# Altium footprint library PcbLib1.PcbLib: 332 footprints (part 3 of 22)
Each footprint in its own frame and in the unit in brackets; x right, y up, seen from the top. Pads: shape width x height; smd on the part's side, far side on the other; paste and mask are expansions set on the pad; w line width, h text height; cw(c..) or ccw(c..) is an arc to the next point about the centre after c.
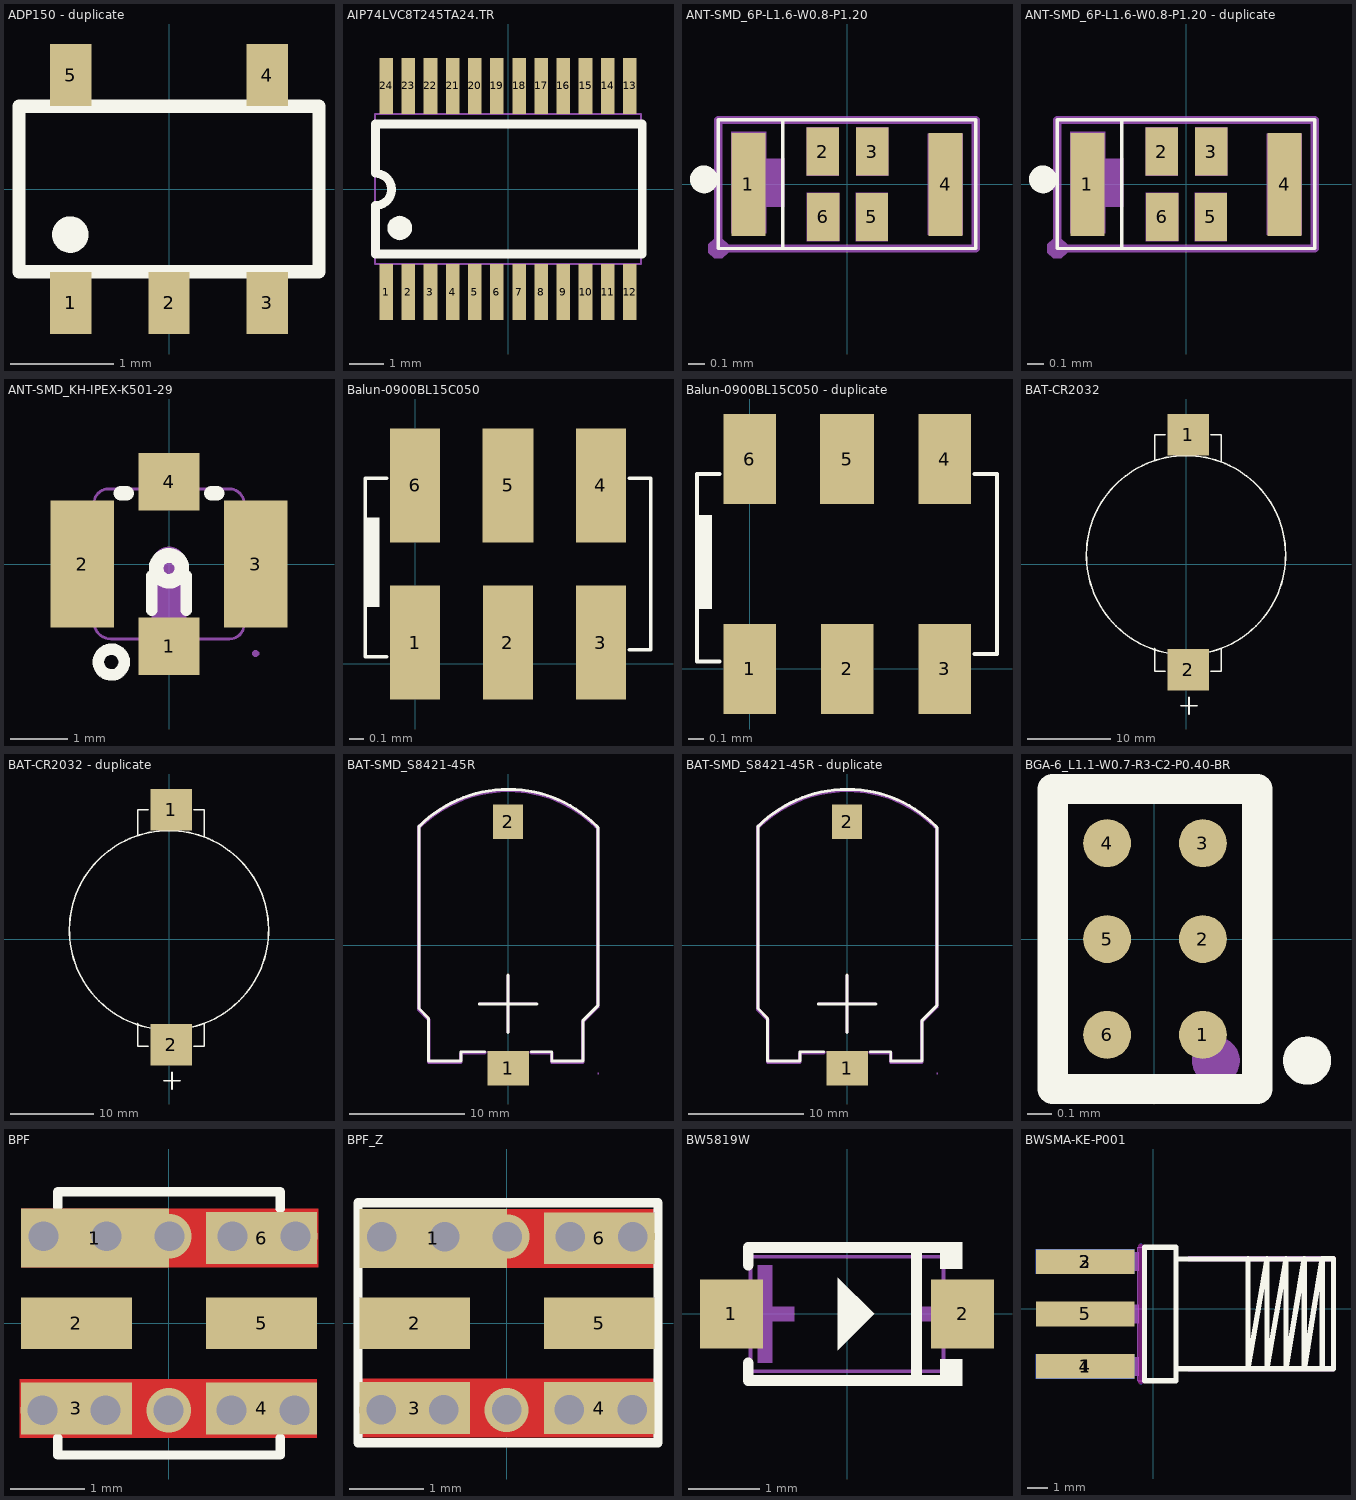
[diagram p2: the footprints below, top view; thin cyan lines are the x and y axes]

## ADP150 - duplicate [mm]
pads (5):
  rect 0.4x0.6 smd: 1(-0.95,-1.1) 2(0,-1.1) 3(0.95,-1.1) 4(0.95,1.1) 5(-0.95,1.1)
Top Overlay:
  circle w0.254: c-0.954,-0.441 r0.048
  lines w0.127: -1.45,-0.8 1.45,-0.8 1.45,0.8 -1.45,0.8 -1.45,-0.8

## AIP74LVC8T245TA24.TR [mm]
pads (24):
  rect 0.4x1.65 smd: 1(-3.575,-3.023) 2(-2.925,-3.023) 3(-2.275,-3.023) 4(-1.625,-3.023) 5(-0.975,-3.023) 6(-0.325,-3.023) 7(0.325,-3.023) 8(0.975,-3.023) 9(1.625,-3.023) 10(2.275,-3.023) 11(2.925,-3.023) 12(3.575,-3.023) 13(3.575,3.023) 14(2.925,3.023) 15(2.275,3.023) 16(1.625,3.023) 17(0.975,3.023) 18(0.325,3.023) 19(-0.325,3.023) 20(-0.975,3.023) 21(-1.625,3.023) 22(-2.275,3.023) 23(-2.925,3.023) 24(-3.575,3.023)
Top Overlay:
  region: -3.529,-1.143 -3.52,-1.064 -3.494,-0.989 -3.452,-0.922 -3.396,-0.866 -3.329,-0.824 -3.254,-0.798 -3.175,-0.789 -3.096,-0.798 -3.021,-0.824 -2.954,-0.866 -2.898,-0.922 -2.856,-0.989 -2.83,-1.064 -2.821,-1.143 -2.83,-1.222 -2.856,-1.297 -2.898,-1.364 -2.954,-1.42 -3.021,-1.462 -3.096,-1.488 -3.175,-1.497 -3.254,-1.488 -3.329,-1.462 -3.396,-1.42 -3.452,-1.364 -3.494,-1.297 -3.52,-1.222
  lines w0.254: -3.886,0.457 cw(c-3.886,-0.013) -3.886,-0.483 -3.886,-1.753 -3.886,-1.905 3.937,-1.905 3.937,1.905 -3.886,1.905 -3.886,1.753 -3.886,0.483
Mechanical 6:
  lines w0.051: -3.9,-2.2 -3.9,2.2 3.9,2.2 3.9,-2.2 -3.9,-2.2
Mechanical 7:
  region: -0.225,2.588 -0.425,2.588 -0.425,2.188 -0.225,2.188
  region: -0.875,2.588 -1.075,2.588 -1.075,2.188 -0.875,2.188
  region: -1.525,2.588 -1.725,2.588 -1.725,2.188 -1.525,2.188
  region: -2.175,2.588 -2.375,2.588 -2.375,2.188 -2.175,2.188
  region: -2.825,2.588 -3.025,2.588 -3.025,2.188 -2.825,2.188
  region: -3.475,2.588 -3.675,2.588 -3.675,2.188 -3.475,2.188
  region: 3.675,2.588 3.475,2.588 3.475,2.188 3.675,2.188
  region: 3.025,2.588 2.825,2.588 2.825,2.188 3.025,2.188
  region: 2.375,2.588 2.175,2.588 2.175,2.188 2.375,2.188
  region: 1.725,2.588 1.525,2.588 1.525,2.188 1.725,2.188
  region: 1.075,2.588 0.875,2.588 0.875,2.188 1.075,2.188
  region: 0.425,2.588 0.225,2.588 0.225,2.188 0.425,2.188
  region: 0.225,-2.588 0.425,-2.588 0.425,-2.188 0.225,-2.188
  region: 0.875,-2.588 1.075,-2.588 1.075,-2.188 0.875,-2.188
  region: 1.525,-2.588 1.725,-2.588 1.725,-2.188 1.525,-2.188
  region: 2.175,-2.588 2.375,-2.588 2.375,-2.188 2.175,-2.188
  region: 2.825,-2.588 3.025,-2.588 3.025,-2.188 2.825,-2.188
  region: 3.475,-2.588 3.675,-2.588 3.675,-2.188 3.475,-2.188
  region: -3.675,-2.588 -3.475,-2.588 -3.475,-2.188 -3.675,-2.188
  region: -3.025,-2.588 -2.825,-2.588 -2.825,-2.188 -3.025,-2.188
  region: -2.375,-2.588 -2.175,-2.588 -2.175,-2.188 -2.375,-2.188
  region: -1.725,-2.588 -1.525,-2.588 -1.525,-2.188 -1.725,-2.188
  region: -1.075,-2.588 -0.875,-2.588 -0.875,-2.188 -1.075,-2.188
  region: -0.425,-2.588 -0.225,-2.588 -0.225,-2.188 -0.425,-2.188
Mechanical 9:
  region: -0.225,2.586 -0.425,2.586 -0.425,3.186 -0.225,3.186
  region: -0.875,2.586 -1.075,2.586 -1.075,3.186 -0.875,3.186
  region: -1.525,2.586 -1.725,2.586 -1.725,3.186 -1.525,3.186
  region: -2.175,2.586 -2.375,2.586 -2.375,3.186 -2.175,3.186
  region: -2.825,2.586 -3.025,2.586 -3.025,3.186 -2.825,3.186
  region: -3.475,2.586 -3.675,2.586 -3.675,3.186 -3.475,3.186
  region: 3.675,2.586 3.475,2.586 3.475,3.186 3.675,3.186
  region: 3.025,2.586 2.825,2.586 2.825,3.186 3.025,3.186
  region: 2.375,2.586 2.175,2.586 2.175,3.186 2.375,3.186
  region: 1.725,2.586 1.525,2.586 1.525,3.186 1.725,3.186
  region: 1.075,2.586 0.875,2.586 0.875,3.186 1.075,3.186
  region: 0.425,2.586 0.225,2.586 0.225,3.186 0.425,3.186
  region: 0.225,-2.586 0.425,-2.586 0.425,-3.186 0.225,-3.186
  region: 0.875,-2.586 1.075,-2.586 1.075,-3.186 0.875,-3.186
  region: 1.525,-2.586 1.725,-2.586 1.725,-3.186 1.525,-3.186
  region: 2.175,-2.586 2.375,-2.586 2.375,-3.186 2.175,-3.186
  region: 2.825,-2.586 3.025,-2.586 3.025,-3.186 2.825,-3.186
  region: 3.475,-2.586 3.675,-2.586 3.675,-3.186 3.475,-3.186
  region: -3.675,-2.586 -3.475,-2.586 -3.475,-3.186 -3.675,-3.186
  region: -3.025,-2.586 -2.825,-2.586 -2.825,-3.186 -3.025,-3.186
  region: -2.375,-2.586 -2.175,-2.586 -2.175,-3.186 -2.375,-3.186
  region: -1.725,-2.586 -1.525,-2.586 -1.525,-3.186 -1.725,-3.186
  region: -1.075,-2.586 -0.875,-2.586 -0.875,-3.186 -1.075,-3.186
  region: -0.425,-2.586 -0.225,-2.586 -0.225,-3.186 -0.425,-3.186

## ANT-SMD_6P-L1.6-W0.8-P1.20 [mil]
pads (6):
  rect 8.3x25.2 smd mask+2: 1(-24.1,0) 4(24.1,0)
  rect 7.9x11.8 smd mask+2: 2(-5.9,8) 3(6.2,8) 5(6.1,-8) 6(-5.8,-8)
Top Overlay:
  circle w4: c-35,1.2 r1.4
  lines w0.8: -15.7,-15.7 -15.7,15.8 ; -31.5,-15.7 31.5,-15.7 31.5,15.8 -31.5,15.8 -31.5,-15.7
Top Paste:
  region: -19.9,12.6 -19.9,-12.6 -28.2,-12.6 -28.2,12.6
  region: 10.2,13.9 10.1,6.1 4.6,6.1 4.6,13.9
  region: 28.2,12.6 28.2,-12.6 19.9,-12.6 19.9,12.6
  region: 10,-6.1 10,-13.9 4.6,-13.9 4.6,-6.1
  region: -4.4,-6.1 -4.4,-13.9 -9.8,-13.9 -9.8,-6.1
  region: -9.9,6 -9.9,13.9 -4.5,13.9 -4.5,6
Mechanical 6:
  region: -26.8,6.3 -26.8,-5.5 -15.4,-5.5 -15.4,6.3
Mechanical 15:
  region: -29.1,-15.7 -29.1,-14.71 -30.51,-13.3 -32.49,-13.3 -33.9,-14.71 -33.9,-15.7 -33.9,-16.69 -32.49,-18.1 -30.51,-18.1 -29.1,-16.69 -29.1,-15.7
  region: -2,13.9 -2,2.1 -9.9,2.1 -9.9,13.9
  region: 10.1,13.9 10.1,2.1 2.3,2.1 2.3,13.9
  region: 10,-2.1 10,-13.9 2.1,-13.9 2.1,-2.1
  region: -1.9,-2.1 -1.9,-13.9 -9.8,-13.9 -9.8,-2.1
  region: 19.8,-12.4 19.8,12.4 28.3,12.4 28.3,-12.4
  region: -28.3,-12 -28.3,12.8 -19.8,12.8 -19.8,-12
  lines w2: -31.5,-15.7 31.5,-15.7 31.5,15.7 -31.5,15.7 -31.5,-15.7

## ANT-SMD_6P-L1.6-W0.8-P1.20 - duplicate [mil]
pads (6):
  rect 8.3x25.2 smd mask+2: 1(-24.1,0) 4(24.1,0)
  rect 7.9x11.8 smd mask+2: 2(-5.9,8) 3(6.2,8) 5(6.1,-8) 6(-5.8,-8)
Top Overlay:
  circle w4: c-35,1.2 r1.4
  lines w0.8: -15.7,-15.7 -15.7,15.8 ; -31.5,-15.7 31.5,-15.7 31.5,15.8 -31.5,15.8 -31.5,-15.7
Top Paste:
  region: -19.9,12.6 -19.9,-12.6 -28.2,-12.6 -28.2,12.6
  region: 10.2,13.9 10.1,6.1 4.6,6.1 4.6,13.9
  region: 28.2,12.6 28.2,-12.6 19.9,-12.6 19.9,12.6
  region: 10,-6.1 10,-13.9 4.6,-13.9 4.6,-6.1
  region: -4.4,-6.1 -4.4,-13.9 -9.8,-13.9 -9.8,-6.1
  region: -9.9,6 -9.9,13.9 -4.5,13.9 -4.5,6
Mechanical 6:
  region: -26.8,6.3 -26.8,-5.5 -15.4,-5.5 -15.4,6.3
Mechanical 15:
  region: -29.1,-15.7 -29.1,-14.71 -30.51,-13.3 -32.49,-13.3 -33.9,-14.71 -33.9,-15.7 -33.9,-16.69 -32.49,-18.1 -30.51,-18.1 -29.1,-16.69 -29.1,-15.7
  region: -2,13.9 -2,2.1 -9.9,2.1 -9.9,13.9
  region: 10.1,13.9 10.1,2.1 2.3,2.1 2.3,13.9
  region: 10,-2.1 10,-13.9 2.1,-13.9 2.1,-2.1
  region: -1.9,-2.1 -1.9,-13.9 -9.8,-13.9 -9.8,-2.1
  region: 19.8,-12.4 19.8,12.4 28.3,12.4 28.3,-12.4
  region: -28.3,-12 -28.3,12.8 -19.8,12.8 -19.8,-12
  lines w2: -31.5,-15.7 31.5,-15.7 31.5,15.7 -31.5,15.7 -31.5,-15.7

## ANT-SMD_KH-IPEX-K501-29 [mm]
pads (4):
  rect 1.05x1 smd paste+0 mask+0.051: 1(0,-1.425) 4(0,1.425)
  rect 1.1x2.2 smd paste+0 mask+0.051: 2(-1.5,0) 3(1.5,0)
Top Overlay:
  circle w0.254: c0,-0.075 r0.224
  circle w0.2: c-1,-1.7 r0.224
  lines w0.2: -0.3,-0.8 -0.3,-0.2 ; 0.3,-0.8 0.3,-0.2
  lines w0.254: -0.837,1.225 -0.731,1.225 ; 0.731,1.225 0.837,1.225
Mechanical 6:
  circle w0.2: c-0.3,-1.625 r0.1
  circle w0.3: c0,0 r0.15
  region: 0.3,-1 0.3,0 -0.3,0 -0.3,-1
Mechanical 15:
  region: 1.56,-1.551 1.56,-1.526 1.525,-1.491 1.475,-1.491 1.44,-1.526 1.44,-1.551 1.44,-1.576 1.475,-1.611 1.525,-1.611 1.56,-1.576 1.56,-1.551
  region: -1.05,0.9 -1.05,-0.9 -1.5,-0.9 -1.5,0.9
  region: 1.05,-0.9 1.05,0.9 1.5,0.9 1.5,-0.9
  region: -0.3,-1 0.3,-1 0.3,-1.551 -0.3,-1.551
  region: 0.3,1.201 -0.3,1.201 -0.3,1.651 0.3,1.651
  lines w0.051: 1.051,-1.299 ccw(c1.051,-1.05) 1.299,-1.05 1.299,-1.045 ccw(c1.299,-1.044) 1.3,-1.044 1.3,1.051 ccw(c1.05,1.051) 1.05,1.301 0.97,1.301 -1.048,1.3 -1.052,1.3 ccw(c-1.052,1.053) -1.299,1.053 -1.299,-0.924 cw(c-1.3,-0.924) -1.3,-0.925 -1.3,-1.007 ccw(c-1.008,-1.007) -1.008,-1.299 1.051,-1.299 ; 1.051,-1.299 1.051,-1.299

## Balun-0900BL15C050 [mm]
height 1.35
pads (6):
  rect 0.35x0.8 smd mask+0.051: 1(0,0.15) 2(0.65,0.15) 3(1.3,0.15) 4(1.3,1.25) 6(0,1.25)
  rect 0.36x0.8 smd mask+0.051: 5(0.65,1.25)
Top Overlay:
  region: -0.25,1.025 -0.35,1.025 -0.35,0.4 -0.25,0.4
  lines w0.025: -0.2,1.3 -0.35,1.3 -0.35,0.05 -0.325,0.05 -0.2,0.05 ; 1.5,1.3 1.65,1.3 1.65,0.1 1.5,0.1 ; 1.5,0.1 1.5,0.1
3D body "Balun0805-2450FB15L0001.STEP": height 0.8, standoff 0, extent -0.344,0.058 1.656,1.308

## Balun-0900BL15C050 - duplicate [mm]
height 1.35
pads (6):
  rect 0.35x0.6 smd mask+0.051: 1(0,0) 2(0.65,0) 3(1.3,0) 4(1.3,1.4) 6(0,1.4)
  rect 0.36x0.6 smd mask+0.051: 5(0.65,1.4)
Top Overlay:
  region: -0.25,1.025 -0.35,1.025 -0.35,0.4 -0.25,0.4
  lines w0.025: -0.2,1.3 -0.35,1.3 -0.35,0.05 -0.325,0.05 -0.2,0.05 ; 1.5,1.3 1.65,1.3 1.65,0.1 1.5,0.1 ; 1.5,0.1 1.5,0.1
3D body "Balun0805-2450FB15L0001.STEP": height 0.8, standoff 0, extent -0.344,0.058 1.656,1.308

## BAT-CR2032 [mm]
pads (2):
  rect 5x5 smd: 1(0.248,15.62) 2(0.248,-12.68)
Top Overlay:
  lines w0.2: -3.752,-10.13 -3.752,-12.88 -2.502,-12.88 ; -3.752,12.62 -3.752,15.62 -2.502,15.62 ; -0.63,-17.02 1.37,-17.02 ; -0.002,13.12 ccw(c0,1.12) 0.002,13.12 ; 0.37,-18.02 0.37,-16.02 ; 2.998,-12.88 4.248,-12.88 4.248,-10.13 ; 2.998,15.62 4.248,15.62 4.248,12.37

## BAT-CR2032 - duplicate [mm]
pads (2):
  rect 5x5 smd: 1(0.248,15.62) 2(0.248,-12.68)
Top Overlay:
  lines w0.2: -3.752,-10.13 -3.752,-12.88 -2.502,-12.88 ; -3.752,12.62 -3.752,15.62 -2.502,15.62 ; -0.63,-17.02 1.37,-17.02 ; -0.002,13.12 ccw(c0,1.12) 0.002,13.12 ; 0.37,-18.02 0.37,-16.02 ; 2.998,-12.88 4.248,-12.88 4.248,-10.13 ; 2.998,15.62 4.248,15.62 4.248,12.37

## BAT-SMD_S8421-45R [mm]
pads (2):
  rect 3.6x3 smd mask+0.05: 1(0,-10.7)
  rect 2.6x3 smd mask+0.05: 2(0,10.7)
Top Overlay:
  lines w0.254: -7.747,10.361 -7.747,-5.515 -6.9,-6.362 -6.9,-10.062 -4.1,-10.062 -4.1,-9.262 -2.031,-9.262 ; -7.7,10.338 cw(c0.025,2.613) 0.025,13.538 0.1,13.538 cw(c0.1,2.916) 7.611,10.427 7.8,10.238 7.8,-5.262 6.5,-6.562 6.5,-10.062 3.8,-10.062 3.8,-9.262 2.031,-9.262 ; -2.5,-5.1 2.5,-5.1 ; 0,-7.6 0,-2.6
Mechanical 6:
  drawing of 6 lines, arcs and shapes, not listed
Mechanical 15:
  region: 7.897,-11.15 7.897,-11.125 7.862,-11.09 7.813,-11.09 7.777,-11.125 7.777,-11.15 7.777,-11.175 7.813,-11.21 7.862,-11.21 7.897,-11.175 7.897,-11.15
  region: -1.4,-9.262 1.4,-9.262 1.4,-11.15 -1.4,-11.15
  region: 1,11.9 1,9.5 -1,9.5 -1,11.9
  lines w0.051: -7.784,-5.26 -7.784,10.361 cw(c-0.118,2.696) -0.118,13.536 -0.037,13.536 0.045,13.536 cw(c0.045,2.696) 7.71,10.361 cw(c7.404,10.055) 7.837,10.055 7.837,-5.26 6.44,-6.53 6.44,-10.086 3.773,-10.086 3.773,-9.262 -4.101,-9.262 -4.101,-10.086 -6.9,-10.086 -6.9,-6.53 -7.784,-5.26

## BAT-SMD_S8421-45R - duplicate [mm]
pads (2):
  rect 3.6x3 smd mask+0.05: 1(0,-10.7)
  rect 2.6x3 smd mask+0.05: 2(0,10.7)
Top Overlay:
  lines w0.254: -7.747,10.361 -7.747,-5.515 -6.9,-6.362 -6.9,-10.062 -4.1,-10.062 -4.1,-9.262 -2.031,-9.262 ; -7.7,10.338 cw(c0.025,2.613) 0.025,13.538 0.1,13.538 cw(c0.1,2.916) 7.611,10.427 7.8,10.238 7.8,-5.262 6.5,-6.562 6.5,-10.062 3.8,-10.062 3.8,-9.262 2.031,-9.262 ; -2.5,-5.1 2.5,-5.1 ; 0,-7.6 0,-2.6
Mechanical 6:
  drawing of 6 lines, arcs and shapes, not listed
Mechanical 15:
  region: 7.897,-11.15 7.897,-11.125 7.862,-11.09 7.813,-11.09 7.777,-11.125 7.777,-11.15 7.777,-11.175 7.813,-11.21 7.862,-11.21 7.897,-11.175 7.897,-11.15
  region: -1.4,-9.262 1.4,-9.262 1.4,-11.15 -1.4,-11.15
  region: 1,11.9 1,9.5 -1,9.5 -1,11.9
  lines w0.051: -7.784,-5.26 -7.784,10.361 cw(c-0.118,2.696) -0.118,13.536 -0.037,13.536 0.045,13.536 cw(c0.045,2.696) 7.71,10.361 cw(c7.404,10.055) 7.837,10.055 7.837,-5.26 6.44,-6.53 6.44,-10.086 3.773,-10.086 3.773,-9.262 -4.101,-9.262 -4.101,-10.086 -6.9,-10.086 -6.9,-6.53 -7.784,-5.26

## BGA-6_L1.1-W0.7-R3-C2-P0.40-BR [mm]
pads (6):
  round 0.2 smd paste-100 mask+0.05: 1(0.203,-0.4) 2(0.203,0) 3(0.203,0.4) 4(-0.197,0.4) 5(-0.197,0) 6(-0.197,-0.4)
Top Overlay:
  circle w0.1: c0.638,-0.508 r0.05
  lines w0.127: -0.423,-0.626 0.429,-0.626 0.429,0.626 -0.423,0.626 -0.423,-0.626
Top Paste:
  region: 0.271,-0.485 0.135,-0.485 0.118,-0.468 0.118,-0.332 0.135,-0.315 0.271,-0.315 0.288,-0.332 0.288,-0.468
  region: 0.271,-0.085 0.135,-0.085 0.118,-0.068 0.118,0.068 0.135,0.085 0.271,0.085 0.288,0.068 0.288,-0.068
  region: 0.271,0.315 0.135,0.315 0.118,0.332 0.118,0.468 0.135,0.485 0.271,0.485 0.288,0.468 0.288,0.332
  region: -0.129,-0.485 -0.265,-0.485 -0.282,-0.468 -0.282,-0.332 -0.265,-0.315 -0.129,-0.315 -0.112,-0.332 -0.112,-0.468
  region: -0.129,-0.085 -0.265,-0.085 -0.282,-0.068 -0.282,0.068 -0.265,0.085 -0.129,0.085 -0.112,0.068 -0.112,-0.068
  region: -0.129,0.315 -0.265,0.315 -0.282,0.332 -0.282,0.468 -0.265,0.485 -0.129,0.485 -0.112,0.468 -0.112,0.332
Mechanical 15:
  circle w0.1: c0.257,-0.508 r0.05

## BPF [mm]
pads (6):
  rect 2x0.8 smd: 1(-1,1.15)
  rect 1.5x0.7 smd: 2(-1.25,0) 3(-1.25,-1.15) 4(1.25,-1.15) 5(1.25,0) 6(1.25,1.15)
via 1.707,1.175 diameter 0.6 hole 0.4
via 0.857,1.175 diameter 0.6 hole 0.4
via 0.006,1.175 diameter 0.6 hole 0.4
via -0.845,1.175 diameter 0.6 hole 0.4
via -1.695,1.175 diameter 0.6 hole 0.4
via -1.707,-1.175 diameter 0.6 hole 0.4
via -0.857,-1.175 diameter 0.6 hole 0.4
via -0.006,-1.175 diameter 0.6 hole 0.4
via 0.845,-1.175 diameter 0.6 hole 0.4
via 1.695,-1.175 diameter 0.6 hole 0.4
Top Layer:
  rectangle: -1.999,0.75 2.017,1.549
  region: 1.999,-0.75 -2.017,-0.75 -2.017,-1.549 1.999,-1.549
Top Overlay:
  lines w0.127: -1.5,-1.549 -1.5,-1.778 1.5,-1.778 1.5,-1.549 ; -1.5,1.575 -1.5,1.778 1.5,1.778 1.5,1.549

## BPF_Z [mm]
pads (6):
  rect 2x0.8 smd: 1(-1,1.15)
  rect 1.5x0.7 smd: 2(-1.25,0) 3(-1.25,-1.15) 4(1.25,-1.15) 5(1.25,0) 6(1.25,1.15)
via 1.695,-1.175 diameter 0.6 hole 0.4
via 0.845,-1.175 diameter 0.6 hole 0.4
via -0.006,-1.175 diameter 0.6 hole 0.4
via -0.857,-1.175 diameter 0.6 hole 0.4
via -1.707,-1.175 diameter 0.6 hole 0.4
via -1.695,1.175 diameter 0.6 hole 0.4
via -0.845,1.175 diameter 0.6 hole 0.4
via 0.006,1.175 diameter 0.6 hole 0.4
via 0.857,1.175 diameter 0.6 hole 0.4
via 1.707,1.175 diameter 0.6 hole 0.4
Top Layer:
  region: 1.999,-0.75 -2.017,-0.75 -2.017,-1.549 1.999,-1.549
  rectangle: -1.999,0.75 2.017,1.549
Top Overlay:
  lines w0.127: -2.019,-1.619 2.047,-1.619 2.047,1.632 -2.019,1.632 -2.019,-1.619

## BW5819W [mm] "肖特基二极管"
pads (2):
  rect 0.88x0.96 smd: 1(-1.61,0) 2(1.61,0)
Top Overlay:
  region: 1.3,-1.003 1.3,-0.632 1.605,-0.633 1.605,-1.003
  region: 1.3,1.002 1.3,0.632 1.605,0.632 1.605,1.002
  region: 0.381,0 -0.127,0.508 -0.127,-0.508
  lines w0.152: -1.376,-0.683 -1.376,-0.926 1.376,-0.926 ; -1.376,0.683 -1.376,0.926 1.376,0.926 ; 0.967,-0.926 0.967,0.926
Mechanical 2:
  region: 1.805,-0.102 1.805,0.102 0.989,0.102 0.989,-0.102
  region: -1.551,-0.102 -1.551,0.102 -0.735,0.102 -0.735,-0.102
  region: -1.245,-0.68 -1.245,0.68 -1.041,0.68 -1.041,-0.68
Mechanical 6:
  lines w0.051: -1.345,-0.8 1.345,-0.8 1.345,0.8 -1.345,0.8 -1.345,-0.8
Mechanical 7:
  region: 1.511,-0.3 1.511,0.3 1.34,0.3 1.34,-0.3
  region: -1.511,0.3 -1.511,-0.3 -1.34,-0.3 -1.34,0.3
Mechanical 9:
  region: 1.851,-0.3 1.501,-0.3 1.501,0.3 1.851,0.3
  region: -1.851,0.3 -1.501,0.3 -1.501,-0.3 -1.851,-0.3

## BWSMA-KE-P001 [mm]
pads (5):
  rect 4.8x1.2 smd: 1(-3.302,-2.804) 2(-3.302,2.296) 5(-3.302,-0.254)
  rect 4.8x1.2 smd far side: 3(-3.302,2.296) 4(-3.302,-2.804)
Top Overlay:
  lines w0.254: -0.408,-3.504 1.116,-3.504 1.116,2.996 -0.408,2.996 -0.408,-3.429 ; 1.116,-2.921 8.244,-2.921 ; 1.116,2.415 8.244,2.435 ; 4.633,2.435 4.633,-2.921 5.558,2.435 5.558,-2.921 6.484,2.435 6.484,-2.921 7.373,2.435 7.373,-2.921 8.244,2.435 ; 8.798,-2.934 8.798,2.446 8.787,2.435 8.244,2.435 ; 8.798,-2.921 8.244,-2.921 ; 8.244,-2.921 8.244,2.435
Keep-Out Layer:
  lines w0.254: -0.602,-3.554 -0.602,3.046
Mechanical 2:
  region: 1.728,2.556 1.728,2.316 8.678,2.316 8.678,-2.804 1.728,-2.804 1.728,-3.044 8.798,-3.044 8.918,-2.924 8.918,2.466 8.828,2.556
Mechanical 6:
  lines w0.051: -0.752,-3.504 -0.752,2.996 1.116,2.996 1.116,-3.504 -0.752,-3.504
Mechanical 8:
  region: 1.176,-3.504 1.176,-3.529 1.141,-3.564 1.091,-3.564 1.056,-3.529 1.056,-3.504 1.056,-3.479 1.091,-3.444 1.141,-3.444 1.176,-3.479 1.176,-3.504
Mechanical 9:
  region: -4.702,2.746 -0.702,2.746 -0.702,1.846 -4.702,1.846
  region: -4.702,0.196 -0.702,0.196 -0.702,-0.704 -4.702,-0.704
  region: -4.702,-2.354 -0.702,-2.354 -0.702,-3.254 -4.702,-3.254
  region: -4.702,2.746 -0.702,2.746 -0.702,1.846 -4.702,1.846
  region: -4.702,-2.354 -0.702,-2.354 -0.702,-3.254 -4.702,-3.254